# Altium footprint library WR-MPC3.PcbLib: 235 footprints (part 9 of 15)
Each footprint in its own frame and in the unit in brackets; x right, y up, seen from the top. Pads: shape width x height; smd on the part's side, far side on the other; paste and mask are expansions set on the pad; w line width, h text height; cw(c..) or ccw(c..) is an arc to the next point about the centre after c.
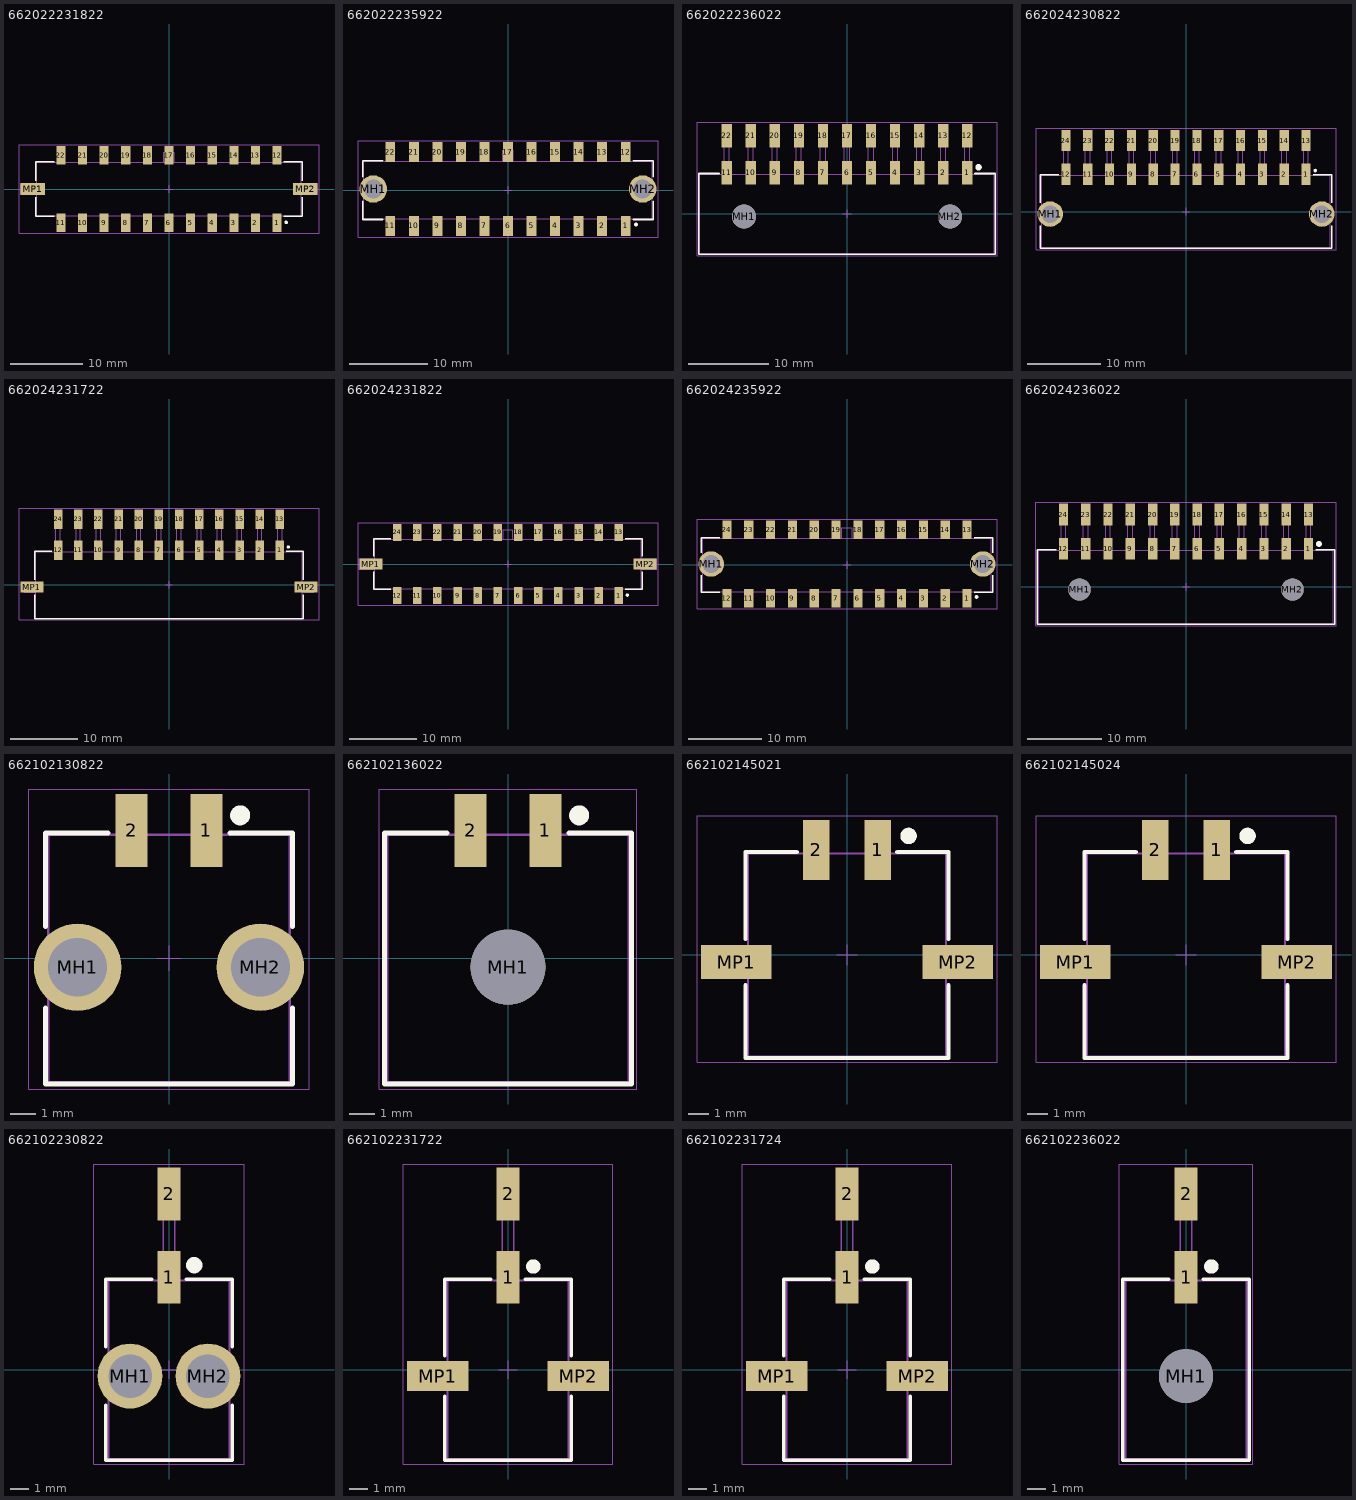
[diagram p8: the footprints below, top view; thin cyan lines are the x and y axes]

## 662022231822 [mm] "3.00mm SMT Male Dual Row Vertical Header with SMT Solder Tab, 22p"
height 9.9
pads (24):
  rect 1.27x2.54 smd: 1(15,-4.7) 2(12,-4.7) 3(9,-4.7) 4(6,-4.7) 5(3,-4.7) 6(0,-4.7) 7(-3,-4.7) 8(-6,-4.7) 9(-9,-4.7) 10(-12,-4.7) 11(-15,-4.7) 12(15,4.7) 13(12,4.7) 14(9,4.7) 15(6,4.7) 16(3,4.7) 17(0,4.7) 18(-3,4.7) 19(-6,4.7) 20(-9,4.7) 21(-12,4.7) 22(-15,4.7)
  rect 3.43x1.65 smd: MP1(-18.895,0) MP2(18.895,0)
Top Overlay:
  circle w0.25: c16.25,-4.625 r0.125
  lines w0.2: -18.5,-1.155 -18.5,-3.755 -15.95,-3.755 ; -18.5,1.155 -18.5,3.755 -15.95,3.755 ; 15.95,-3.755 18.5,-3.755 18.5,-1.155 ; 15.95,3.755 18.5,3.755 18.5,1.155
Top Designator:
  text ".Designator" at -7.498,-0.5 h1.5
Top Component Outline:
  lines w0.1: -18.35,-0.75 -20.6,-0.75 -20.6,0.75 -18.35,0.75 ; -15.32,-3.68 -15.32,-5.698 -14.68,-5.698 -14.68,-3.68 ; -15.32,3.68 -15.32,5.698 -14.68,5.698 -14.68,3.68 ; -12.32,-3.68 -12.32,-5.698 -11.68,-5.698 -11.68,-3.68 ; -12.32,3.68 -12.32,5.698 -11.68,5.698 -11.68,3.68 ; -9.32,-3.68 -9.32,-5.698 -8.68,-5.698 -8.68,-3.68 ; -9.32,3.68 -9.32,5.698 -8.68,5.698 -8.68,3.68 ; -6.32,-3.68 -6.32,-5.698 -5.68,-5.698 -5.68,-3.68 ; -6.32,3.68 -6.32,5.698 -5.68,5.698 -5.68,3.68 ; -3.32,-3.68 -3.32,-5.698 -2.68,-5.698 -2.68,-3.68 ; -3.32,3.68 -3.32,5.698 -2.68,5.698 -2.68,3.68 ; -0.7,3.68 -0.7,5.08 0.7,5.08 0.7,3.68 ; -0.32,-3.68 -0.32,-5.698 0.32,-5.698 0.32,-3.68 ; -0.32,3.68 -0.32,5.698 0.32,5.698 0.32,3.68 ; 2.68,-3.68 2.68,-5.698 3.32,-5.698 3.32,-3.68 ; 2.68,3.68 2.68,5.698 3.32,5.698 3.32,3.68 ; 5.68,-3.68 5.68,-5.698 6.32,-5.698 6.32,-3.68 ; 5.68,3.68 5.68,5.698 6.32,5.698 6.32,3.68 ; 8.68,-3.68 8.68,-5.698 9.32,-5.698 9.32,-3.68 ; 8.68,3.68 8.68,5.698 9.32,5.698 9.32,3.68 ; 11.68,-3.68 11.68,-5.698 12.32,-5.698 12.32,-3.68 ; 11.68,3.68 11.68,5.698 12.32,5.698 12.32,3.68 ; 14.68,-3.68 14.68,-5.698 15.32,-5.698 15.32,-3.68 ; 14.68,3.68 14.68,5.698 15.32,5.698 15.32,3.68 ; 18.35,-0.75 20.6,-0.75 20.6,0.75 18.35,0.75 ; -18.35,-3.68 18.35,-3.68 18.35,3.68 -18.35,3.68 -18.35,-3.68
Top 3D Body:
  lines w0.1: -18.35,-0.75 -20.6,-0.75 -20.6,0.75 -18.35,0.75 ; -15.32,-3.68 -15.32,-5.698 -14.68,-5.698 -14.68,-3.68 ; -15.32,3.68 -15.32,5.698 -14.68,5.698 -14.68,3.68 ; -12.32,-3.68 -12.32,-5.698 -11.68,-5.698 -11.68,-3.68 ; -12.32,3.68 -12.32,5.698 -11.68,5.698 -11.68,3.68 ; -9.32,-3.68 -9.32,-5.698 -8.68,-5.698 -8.68,-3.68 ; -9.32,3.68 -9.32,5.698 -8.68,5.698 -8.68,3.68 ; -6.32,-3.68 -6.32,-5.698 -5.68,-5.698 -5.68,-3.68 ; -6.32,3.68 -6.32,5.698 -5.68,5.698 -5.68,3.68 ; -3.32,-3.68 -3.32,-5.698 -2.68,-5.698 -2.68,-3.68 ; -3.32,3.68 -3.32,5.698 -2.68,5.698 -2.68,3.68 ; -0.7,3.68 -0.7,5.08 0.7,5.08 0.7,3.68 ; -0.32,-3.68 -0.32,-5.698 0.32,-5.698 0.32,-3.68 ; -0.32,3.68 -0.32,5.698 0.32,5.698 0.32,3.68 ; 2.68,-3.68 2.68,-5.698 3.32,-5.698 3.32,-3.68 ; 2.68,3.68 2.68,5.698 3.32,5.698 3.32,3.68 ; 5.68,-3.68 5.68,-5.698 6.32,-5.698 6.32,-3.68 ; 5.68,3.68 5.68,5.698 6.32,5.698 6.32,3.68 ; 8.68,-3.68 8.68,-5.698 9.32,-5.698 9.32,-3.68 ; 8.68,3.68 8.68,5.698 9.32,5.698 9.32,3.68 ; 11.68,-3.68 11.68,-5.698 12.32,-5.698 12.32,-3.68 ; 11.68,3.68 11.68,5.698 12.32,5.698 12.32,3.68 ; 14.68,-3.68 14.68,-5.698 15.32,-5.698 15.32,-3.68 ; 14.68,3.68 14.68,5.698 15.32,5.698 15.32,3.68 ; 18.35,-0.75 20.6,-0.75 20.6,0.75 18.35,0.75 ; -18.35,-3.68 18.35,-3.68 18.35,3.68 -18.35,3.68 -18.35,-3.68
Top Courtyard:
  lines w0.05: -20.81,-6.17 -20.81,6.17 20.81,6.17 20.81,-6.17 -20.81,-6.17
Top Component Center:
  lines w0.05: -0.5,0 0.5,0 ; 0,-0.5 0,0.5
3D body "662022231822.stp": height 9.93, standoff 0.03, extent -20.6,-5.698 20.6,5.698

## 662022235922 [mm] "Dual row SMT Vertical header With TH metal clip 22p"
height 9.9
pads (24):
  rect 1.27x2.54 smd: 1(15,-4.57) 2(12,-4.57) 3(9,-4.57) 4(6,-4.57) 5(3,-4.57) 6(0,-4.57) 7(-3,-4.57) 8(-6,-4.57) 9(-9,-4.57) 10(-12,-4.57) 11(-15,-4.57) 12(15,4.83) 13(12,4.83) 14(9,4.83) 15(6,4.83) 16(3,4.83) 17(0,4.83) 18(-3,4.83) 19(-6,4.83) 20(-9,4.83) 21(-12,4.83) 22(-15,4.83)
  round 3.5 hole 2.41: MH1(-17.16,0.13) MH2(17.16,0.13)
Top Overlay:
  circle w0.25: c16.3,-4.4 r0.125
  lines w0.2: -18.5,-1.405 -18.5,-3.755 -15.95,-3.755 ; -18.5,1.665 -18.5,3.755 -15.95,3.755 ; 15.95,-3.755 18.5,-3.755 18.5,-1.405 ; 15.95,3.755 18.5,3.755 18.5,1.665
Top Designator:
  text ".Designator" at -7.498,-0.5 h1.5
Top Component Outline:
  lines w0.1: -15.32,-3.68 -15.32,-5.5 -14.68,-5.5 -14.68,-3.68 ; -15.32,3.68 -15.32,5.9 -14.68,5.9 -14.68,3.68 ; -12.32,-3.68 -12.32,-5.5 -11.68,-5.5 -11.68,-3.68 ; -12.32,3.68 -12.32,5.9 -11.68,5.9 -11.68,3.68 ; -9.32,-3.68 -9.32,-5.5 -8.68,-5.5 -8.68,-3.68 ; -9.32,3.68 -9.32,5.9 -8.68,5.9 -8.68,3.68 ; -6.32,-3.68 -6.32,-5.5 -5.68,-5.5 -5.68,-3.68 ; -6.32,3.68 -6.32,5.9 -5.68,5.9 -5.68,3.68 ; -3.32,-3.68 -3.32,-5.5 -2.68,-5.5 -2.68,-3.68 ; -3.32,3.68 -3.32,5.9 -2.68,5.9 -2.68,3.68 ; -0.7,3.68 -0.7,5.08 0.7,5.08 0.7,3.68 ; -0.32,-3.68 -0.32,-5.5 0.32,-5.5 0.32,-3.68 ; -0.32,3.68 -0.32,5.9 0.32,5.9 0.32,3.68 ; 2.68,-3.68 2.68,-5.5 3.32,-5.5 3.32,-3.68 ; 2.68,3.68 2.68,5.9 3.32,5.9 3.32,3.68 ; 5.68,-3.68 5.68,-5.5 6.32,-5.5 6.32,-3.68 ; 5.68,3.68 5.68,5.9 6.32,5.9 6.32,3.68 ; 8.68,-3.68 8.68,-5.5 9.32,-5.5 9.32,-3.68 ; 8.68,3.68 8.68,5.9 9.32,5.9 9.32,3.68 ; 11.68,-3.68 11.68,-5.5 12.32,-5.5 12.32,-3.68 ; 11.68,3.68 11.68,5.9 12.32,5.9 12.32,3.68 ; 14.68,-3.68 14.68,-5.5 15.32,-5.5 15.32,-3.68 ; 14.68,3.68 14.68,5.9 15.32,5.9 15.32,3.68 ; -18.35,-3.68 -18.35,3.68 18.35,3.68 18.35,-3.68 -18.35,-3.68
Top 3D Body:
  lines w0.1: -15.32,-3.68 -15.32,-5.5 -14.68,-5.5 -14.68,-3.68 ; -15.32,3.68 -15.32,5.9 -14.68,5.9 -14.68,3.68 ; -12.32,-3.68 -12.32,-5.5 -11.68,-5.5 -11.68,-3.68 ; -12.32,3.68 -12.32,5.9 -11.68,5.9 -11.68,3.68 ; -9.32,-3.68 -9.32,-5.5 -8.68,-5.5 -8.68,-3.68 ; -9.32,3.68 -9.32,5.9 -8.68,5.9 -8.68,3.68 ; -6.32,-3.68 -6.32,-5.5 -5.68,-5.5 -5.68,-3.68 ; -6.32,3.68 -6.32,5.9 -5.68,5.9 -5.68,3.68 ; -3.32,-3.68 -3.32,-5.5 -2.68,-5.5 -2.68,-3.68 ; -3.32,3.68 -3.32,5.9 -2.68,5.9 -2.68,3.68 ; -0.7,3.68 -0.7,5.08 0.7,5.08 0.7,3.68 ; -0.32,-3.68 -0.32,-5.5 0.32,-5.5 0.32,-3.68 ; -0.32,3.68 -0.32,5.9 0.32,5.9 0.32,3.68 ; 2.68,-3.68 2.68,-5.5 3.32,-5.5 3.32,-3.68 ; 2.68,3.68 2.68,5.9 3.32,5.9 3.32,3.68 ; 5.68,-3.68 5.68,-5.5 6.32,-5.5 6.32,-3.68 ; 5.68,3.68 5.68,5.9 6.32,5.9 6.32,3.68 ; 8.68,-3.68 8.68,-5.5 9.32,-5.5 9.32,-3.68 ; 8.68,3.68 8.68,5.9 9.32,5.9 9.32,3.68 ; 11.68,-3.68 11.68,-5.5 12.32,-5.5 12.32,-3.68 ; 11.68,3.68 11.68,5.9 12.32,5.9 12.32,3.68 ; 14.68,-3.68 14.68,-5.5 15.32,-5.5 15.32,-3.68 ; 14.68,3.68 14.68,5.9 15.32,5.9 15.32,3.68 ; -18.35,-3.68 -18.35,3.68 18.35,3.68 18.35,-3.68 -18.35,-3.68
Top Courtyard:
  lines w0.05: -19.11,-6.04 -19.11,6.3 19.11,6.3 19.11,-6.04 -19.11,-6.04
Top Component Center:
  lines w0.05: -0.5,0 0.5,0 ; 0,-0.5 0,0.5
3D body "662022235922.stp": height 9.92, standoff -3.08, extent -18.35,-5.5 18.35,5.9

## 662022236022 [mm] "3.00mm SMT Male Dual Row Angled Header with Plastic Pegs, 22p"
height 8.26
pads (24):
  rect 1.27x2.92 smd: 1(15,5.13) 2(12,5.13) 3(9,5.13) 4(6,5.13) 5(3,5.13) 6(0,5.13) 7(-3,5.13) 8(-6,5.13) 9(-9,5.13) 10(-12,5.13) 11(-15,5.13) 12(15,9.75) 13(12,9.75) 14(9,9.75) 15(6,9.75) 16(3,9.75) 17(0,9.75) 18(-3,9.75) 19(-6,9.75) 20(-9,9.75) 21(-12,9.75) 22(-15,9.75)
  round 3 hole 3 unplated: MH1(-12.84,-0.35) MH2(12.84,-0.35)
Top Overlay:
  circle w0.4: c16.4,5.8 r0.2
  lines w0.2: -15.95,5.025 -18.5,5.025 -18.5,-5.025 18.5,-5.025 18.5,5.025 15.95,5.025
Top Designator:
  text ".Designator" at -7.498,-0.5 h1.5
Top Component Outline:
  lines w0.1: -15.32,4.95 -15.32,10.95 -14.68,10.95 -14.68,4.95 ; -15.32,6.3 -14.68,6.3 ; -12.32,4.95 -12.32,10.95 -11.68,10.95 -11.68,4.95 ; -12.32,6.3 -11.68,6.3 ; -9.32,4.95 -9.32,10.95 -8.68,10.95 -8.68,4.95 ; -9.32,6.3 -8.68,6.3 ; -6.32,4.95 -6.32,10.95 -5.68,10.95 -5.68,4.95 ; -6.32,6.3 -5.68,6.3 ; -3.32,4.95 -3.32,10.95 -2.68,10.95 -2.68,4.95 ; -3.32,6.3 -2.68,6.3 ; -0.32,4.95 -0.32,10.95 0.32,10.95 0.32,4.95 ; -0.32,6.3 0.32,6.3 ; 2.68,4.95 2.68,10.95 3.32,10.95 3.32,4.95 ; 2.68,6.3 3.32,6.3 ; 5.68,4.95 5.68,10.95 6.32,10.95 6.32,4.95 ; 5.68,6.3 6.32,6.3 ; 8.68,4.95 8.68,10.95 9.32,10.95 9.32,4.95 ; 8.68,6.3 9.32,6.3 ; 11.68,4.95 11.68,10.95 12.32,10.95 12.32,4.95 ; 11.68,6.3 12.32,6.3 ; 14.68,4.95 14.68,10.95 15.32,10.95 15.32,4.95 ; 14.68,6.3 15.32,6.3 ; -18.35,-4.95 18.35,-4.95 18.35,4.95 -18.35,4.95 -18.35,-4.95
Top 3D Body:
  lines w0.1: -15.32,4.95 -15.32,10.95 -14.68,10.95 -14.68,4.95 ; -15.32,6.3 -14.68,6.3 ; -12.32,4.95 -12.32,10.95 -11.68,10.95 -11.68,4.95 ; -12.32,6.3 -11.68,6.3 ; -9.32,4.95 -9.32,10.95 -8.68,10.95 -8.68,4.95 ; -9.32,6.3 -8.68,6.3 ; -6.32,4.95 -6.32,10.95 -5.68,10.95 -5.68,4.95 ; -6.32,6.3 -5.68,6.3 ; -3.32,4.95 -3.32,10.95 -2.68,10.95 -2.68,4.95 ; -3.32,6.3 -2.68,6.3 ; -0.32,4.95 -0.32,10.95 0.32,10.95 0.32,4.95 ; -0.32,6.3 0.32,6.3 ; 2.68,4.95 2.68,10.95 3.32,10.95 3.32,4.95 ; 2.68,6.3 3.32,6.3 ; 5.68,4.95 5.68,10.95 6.32,10.95 6.32,4.95 ; 5.68,6.3 6.32,6.3 ; 8.68,4.95 8.68,10.95 9.32,10.95 9.32,4.95 ; 8.68,6.3 9.32,6.3 ; 11.68,4.95 11.68,10.95 12.32,10.95 12.32,4.95 ; 11.68,6.3 12.32,6.3 ; 14.68,4.95 14.68,10.95 15.32,10.95 15.32,4.95 ; 14.68,6.3 15.32,6.3 ; -18.35,-4.95 18.35,-4.95 18.35,4.95 -18.35,4.95 -18.35,-4.95
Top Courtyard:
  lines w0.05: -18.7,-5.225 18.7,-5.225 18.7,11.41 -18.7,11.41 -18.7,-5.225
Top Component Center:
  lines w0.05: -0.5,0 0.5,0 ; 0,-0.5 0,0.5
3D body "662022236022.stp": height 8.79, standoff -3.17, extent -18.35,-4.95 18.35,10.95

## 662024230822 [mm] "Dual row SMT Right angle header With TH Metal Clip 24p"
height 8.76
pads (26):
  rect 1.27x2.92 smd: 1(16.5,5.13) 2(13.5,5.13) 3(10.5,5.13) 4(7.5,5.13) 5(4.5,5.13) 6(1.5,5.13) 7(-1.5,5.13) 8(-4.5,5.13) 9(-7.5,5.13) 10(-10.5,5.13) 11(-13.5,5.13) 12(-16.5,5.13) 13(16.5,9.75) 14(13.5,9.75) 15(10.5,9.75) 16(7.5,9.75) 17(4.5,9.75) 18(1.5,9.75) 19(-1.5,9.75) 20(-4.5,9.75) 21(-7.5,9.75) 22(-10.5,9.75) 23(-13.5,9.75) 24(-16.5,9.75)
  round 3.5 hole 2.41: MH1(-18.66,-0.35) MH2(18.66,-0.35)
Top Overlay:
  circle w0.25: c17.75,5.625 r0.125
  lines w0.2: -20,-1.925 -20,-5.025 20,-5.025 20,-1.925 ; -20,1.225 -20,5.025 -17.45,5.025 ; 17.45,5.025 20,5.025 20,1.225
Top Designator:
  text ".Designator" at -7.498,-0.5 h1.5
Top Component Outline:
  lines w0.1: -16.82,4.95 -16.82,10.95 -16.18,10.95 -16.18,4.95 ; -16.82,6.3 -16.18,6.3 ; -13.82,4.95 -13.82,10.95 -13.18,10.95 -13.18,4.95 ; -13.82,6.3 -13.18,6.3 ; -10.82,4.95 -10.82,10.95 -10.18,10.95 -10.18,4.95 ; -10.82,6.3 -10.18,6.3 ; -7.82,4.95 -7.82,10.95 -7.18,10.95 -7.18,4.95 ; -7.82,6.3 -7.18,6.3 ; -4.82,4.95 -4.82,10.95 -4.18,10.95 -4.18,4.95 ; -4.82,6.3 -4.18,6.3 ; -1.82,4.95 -1.82,10.95 -1.18,10.95 -1.18,4.95 ; -1.82,6.3 -1.18,6.3 ; 1.18,4.95 1.18,10.95 1.82,10.95 1.82,4.95 ; 1.18,6.3 1.82,6.3 ; 4.18,4.95 4.18,10.95 4.82,10.95 4.82,4.95 ; 4.18,6.3 4.82,6.3 ; 7.18,4.95 7.18,10.95 7.82,10.95 7.82,4.95 ; 7.18,6.3 7.82,6.3 ; 10.18,4.95 10.18,10.95 10.82,10.95 10.82,4.95 ; 10.18,6.3 10.82,6.3 ; 13.18,4.95 13.18,10.95 13.82,10.95 13.82,4.95 ; 13.18,6.3 13.82,6.3 ; 16.18,4.95 16.18,10.95 16.82,10.95 16.82,4.95 ; 16.18,6.3 16.82,6.3 ; -19.85,-4.95 19.85,-4.95 19.85,4.95 -19.85,4.95 -19.85,-4.95
Top 3D Body:
  lines w0.1: -16.82,4.95 -16.82,10.95 -16.18,10.95 -16.18,4.95 ; -16.82,6.3 -16.18,6.3 ; -13.82,4.95 -13.82,10.95 -13.18,10.95 -13.18,4.95 ; -13.82,6.3 -13.18,6.3 ; -10.82,4.95 -10.82,10.95 -10.18,10.95 -10.18,4.95 ; -10.82,6.3 -10.18,6.3 ; -7.82,4.95 -7.82,10.95 -7.18,10.95 -7.18,4.95 ; -7.82,6.3 -7.18,6.3 ; -4.82,4.95 -4.82,10.95 -4.18,10.95 -4.18,4.95 ; -4.82,6.3 -4.18,6.3 ; -1.82,4.95 -1.82,10.95 -1.18,10.95 -1.18,4.95 ; -1.82,6.3 -1.18,6.3 ; 1.18,4.95 1.18,10.95 1.82,10.95 1.82,4.95 ; 1.18,6.3 1.82,6.3 ; 4.18,4.95 4.18,10.95 4.82,10.95 4.82,4.95 ; 4.18,6.3 4.82,6.3 ; 7.18,4.95 7.18,10.95 7.82,10.95 7.82,4.95 ; 7.18,6.3 7.82,6.3 ; 10.18,4.95 10.18,10.95 10.82,10.95 10.82,4.95 ; 10.18,6.3 10.82,6.3 ; 13.18,4.95 13.18,10.95 13.82,10.95 13.82,4.95 ; 13.18,6.3 13.82,6.3 ; 16.18,4.95 16.18,10.95 16.82,10.95 16.82,4.95 ; 16.18,6.3 16.82,6.3 ; -19.85,-4.95 -19.85,4.95 19.85,4.95 19.85,-4.95 -19.85,-4.95
Top Courtyard:
  lines w0.05: -20.61,-5.225 20.61,-5.225 20.61,11.41 -20.61,11.41 -20.61,-5.225
Top Component Center:
  lines w0.05: -0.5,0 0.5,0 ; 0,-0.5 0,0.5
3D body "662024230822.stp": height 8.78, standoff -3.08, extent -19.85,-4.95 19.85,10.95

## 662024231722 [mm] "3.00mm SMT Male Dual Row Angled Header with SMT Solder Tab, 24p"
height 8.26
pads (26):
  rect 1.27x2.92 smd: 1(16.5,5.13) 2(13.5,5.13) 3(10.5,5.13) 4(7.5,5.13) 5(4.5,5.13) 6(1.5,5.13) 7(-1.5,5.13) 8(-4.5,5.13) 9(-7.5,5.13) 10(-10.5,5.13) 11(-13.5,5.13) 12(-16.5,5.13) 13(16.5,9.75) 14(13.5,9.75) 15(10.5,9.75) 16(7.5,9.75) 17(4.5,9.75) 18(1.5,9.75) 19(-1.5,9.75) 20(-4.5,9.75) 21(-7.5,9.75) 22(-10.5,9.75) 23(-13.5,9.75) 24(-16.5,9.75)
  rect 3.43x1.65 smd: MP1(-20.395,-0.35) MP2(20.395,-0.35)
Top Overlay:
  circle w0.25: c17.75,5.625 r0.125
  lines w0.2: -20,-1.475 -20,-5.025 20,-5.025 20,-1.475 ; -20,0.775 -20,5.025 -17.45,5.025 ; 17.45,5.025 20,5.025 20,0.775
Top Designator:
  text ".Designator" at -7.498,-0.5 h1.5
Top Component Outline:
  lines w0.1: -19.85,-1.1 -21.55,-1.1 -21.55,0.4 -19.85,0.4 ; -16.82,4.95 -16.82,10.95 -16.18,10.95 -16.18,4.95 ; -16.82,6.3 -16.18,6.3 ; -13.82,4.95 -13.82,10.95 -13.18,10.95 -13.18,4.95 ; -13.82,6.3 -13.18,6.3 ; -10.82,4.95 -10.82,10.95 -10.18,10.95 -10.18,4.95 ; -10.82,6.3 -10.18,6.3 ; -7.82,4.95 -7.82,10.95 -7.18,10.95 -7.18,4.95 ; -7.82,6.3 -7.18,6.3 ; -4.82,4.95 -4.82,10.95 -4.18,10.95 -4.18,4.95 ; -4.82,6.3 -4.18,6.3 ; -1.82,4.95 -1.82,10.95 -1.18,10.95 -1.18,4.95 ; -1.82,6.3 -1.18,6.3 ; 1.18,4.95 1.18,10.95 1.82,10.95 1.82,4.95 ; 1.18,6.3 1.82,6.3 ; 4.18,4.95 4.18,10.95 4.82,10.95 4.82,4.95 ; 4.18,6.3 4.82,6.3 ; 7.18,4.95 7.18,10.95 7.82,10.95 7.82,4.95 ; 7.18,6.3 7.82,6.3 ; 10.18,4.95 10.18,10.95 10.82,10.95 10.82,4.95 ; 10.18,6.3 10.82,6.3 ; 13.18,4.95 13.18,10.95 13.82,10.95 13.82,4.95 ; 13.18,6.3 13.82,6.3 ; 16.18,4.95 16.18,10.95 16.82,10.95 16.82,4.95 ; 16.18,6.3 16.82,6.3 ; 19.85,-1.1 21.55,-1.1 21.55,0.4 19.85,0.4 ; -19.85,-4.95 19.85,-4.95 19.85,4.95 -19.85,4.95 -19.85,-4.95
Top 3D Body:
  lines w0.1: -19.85,-1.1 -21.55,-1.1 -21.55,0.4 -19.85,0.4 ; -16.82,4.95 -16.82,10.95 -16.18,10.95 -16.18,4.95 ; -16.82,6.3 -16.18,6.3 ; -13.82,4.95 -13.82,10.95 -13.18,10.95 -13.18,4.95 ; -13.82,6.3 -13.18,6.3 ; -10.82,4.95 -10.82,10.95 -10.18,10.95 -10.18,4.95 ; -10.82,6.3 -10.18,6.3 ; -7.82,4.95 -7.82,10.95 -7.18,10.95 -7.18,4.95 ; -7.82,6.3 -7.18,6.3 ; -4.82,4.95 -4.82,10.95 -4.18,10.95 -4.18,4.95 ; -4.82,6.3 -4.18,6.3 ; -1.82,4.95 -1.82,10.95 -1.18,10.95 -1.18,4.95 ; -1.82,6.3 -1.18,6.3 ; 1.18,4.95 1.18,10.95 1.82,10.95 1.82,4.95 ; 1.18,6.3 1.82,6.3 ; 4.18,4.95 4.18,10.95 4.82,10.95 4.82,4.95 ; 4.18,6.3 4.82,6.3 ; 7.18,4.95 7.18,10.95 7.82,10.95 7.82,4.95 ; 7.18,6.3 7.82,6.3 ; 10.18,4.95 10.18,10.95 10.82,10.95 10.82,4.95 ; 10.18,6.3 10.82,6.3 ; 13.18,4.95 13.18,10.95 13.82,10.95 13.82,4.95 ; 13.18,6.3 13.82,6.3 ; 16.18,4.95 16.18,10.95 16.82,10.95 16.82,4.95 ; 16.18,6.3 16.82,6.3 ; 19.85,-1.1 21.55,-1.1 21.55,0.4 19.85,0.4 ; -19.85,-4.95 -19.85,4.95 19.85,4.95 19.85,-4.95 -19.85,-4.95
Top Courtyard:
  lines w0.05: -22.31,-5.225 -22.31,11.41 22.31,11.41 22.31,-5.225 -22.31,-5.225
Top Component Center:
  lines w0.05: -0.5,0 0.5,0 ; 0,-0.5 0,0.5
3D body "662024231722.stp": height 8.79, standoff 0.03, extent -21.55,-4.95 21.55,10.95

## 662024231822 [mm] "3.00mm SMT Male Dual Row Vertical Header with SMT Solder Tab, 24p"
height 9.9
pads (26):
  rect 1.27x2.54 smd: 1(16.5,-4.7) 2(13.5,-4.7) 3(10.5,-4.7) 4(7.5,-4.7) 5(4.5,-4.7) 6(1.5,-4.7) 7(-1.5,-4.7) 8(-4.5,-4.7) 9(-7.5,-4.7) 10(-10.5,-4.7) 11(-13.5,-4.7) 12(-16.5,-4.7) 13(16.5,4.7) 14(13.5,4.7) 15(10.5,4.7) 16(7.5,4.7) 17(4.5,4.7) 18(1.5,4.7) 19(-1.5,4.7) 20(-4.5,4.7) 21(-7.5,4.7) 22(-10.5,4.7) 23(-13.5,4.7) 24(-16.5,4.7)
  rect 3.43x1.65 smd: MP1(-20.395,0) MP2(20.395,0)
Top Overlay:
  circle w0.25: c17.75,-4.625 r0.125
  lines w0.2: -20,-1.155 -20,-3.755 -17.45,-3.755 ; -20,1.155 -20,3.755 -17.45,3.755 ; 17.45,-3.755 20,-3.755 20,-1.155 ; 17.45,3.755 20,3.755 20,1.155
Top Designator:
  text ".Designator" at -7.498,-0.5 h1.5
Top Component Outline:
  lines w0.1: -19.85,-0.75 -22.1,-0.75 -22.1,0.75 -19.85,0.75 ; -16.82,-3.68 -16.82,-5.698 -16.18,-5.698 -16.18,-3.68 ; -16.82,3.68 -16.82,5.698 -16.18,5.698 -16.18,3.68 ; -13.82,-3.68 -13.82,-5.698 -13.18,-5.698 -13.18,-3.68 ; -13.82,3.68 -13.82,5.698 -13.18,5.698 -13.18,3.68 ; -10.82,-3.68 -10.82,-5.698 -10.18,-5.698 -10.18,-3.68 ; -10.82,3.68 -10.82,5.698 -10.18,5.698 -10.18,3.68 ; -7.82,-3.68 -7.82,-5.698 -7.18,-5.698 -7.18,-3.68 ; -7.82,3.68 -7.82,5.698 -7.18,5.698 -7.18,3.68 ; -4.82,-3.68 -4.82,-5.698 -4.18,-5.698 -4.18,-3.68 ; -4.82,3.68 -4.82,5.698 -4.18,5.698 -4.18,3.68 ; -1.82,-3.68 -1.82,-5.698 -1.18,-5.698 -1.18,-3.68 ; -1.82,3.68 -1.82,5.698 -1.18,5.698 -1.18,3.68 ; -0.7,3.68 -0.7,5.08 0.7,5.08 0.7,3.68 ; 1.18,-3.68 1.18,-5.698 1.82,-5.698 1.82,-3.68 ; 1.18,3.68 1.18,5.698 1.82,5.698 1.82,3.68 ; 4.18,-3.68 4.18,-5.698 4.82,-5.698 4.82,-3.68 ; 4.18,3.68 4.18,5.698 4.82,5.698 4.82,3.68 ; 7.18,-3.68 7.18,-5.698 7.82,-5.698 7.82,-3.68 ; 7.18,3.68 7.18,5.698 7.82,5.698 7.82,3.68 ; 10.18,-3.68 10.18,-5.698 10.82,-5.698 10.82,-3.68 ; 10.18,3.68 10.18,5.698 10.82,5.698 10.82,3.68 ; 13.18,-3.68 13.18,-5.698 13.82,-5.698 13.82,-3.68 ; 13.18,3.68 13.18,5.698 13.82,5.698 13.82,3.68 ; 16.18,-3.68 16.18,-5.698 16.82,-5.698 16.82,-3.68 ; 16.18,3.68 16.18,5.698 16.82,5.698 16.82,3.68 ; 19.85,-0.75 22.1,-0.75 22.1,0.75 19.85,0.75 ; -19.85,-3.68 -19.85,3.68 19.85,3.68 19.85,-3.68 -19.85,-3.68
Top 3D Body:
  lines w0.1: -19.85,-0.75 -22.1,-0.75 -22.1,0.75 -19.85,0.75 ; -16.82,-3.68 -16.82,-5.698 -16.18,-5.698 -16.18,-3.68 ; -16.82,3.68 -16.82,5.698 -16.18,5.698 -16.18,3.68 ; -13.82,-3.68 -13.82,-5.698 -13.18,-5.698 -13.18,-3.68 ; -13.82,3.68 -13.82,5.698 -13.18,5.698 -13.18,3.68 ; -10.82,-3.68 -10.82,-5.698 -10.18,-5.698 -10.18,-3.68 ; -10.82,3.68 -10.82,5.698 -10.18,5.698 -10.18,3.68 ; -7.82,-3.68 -7.82,-5.698 -7.18,-5.698 -7.18,-3.68 ; -7.82,3.68 -7.82,5.698 -7.18,5.698 -7.18,3.68 ; -4.82,-3.68 -4.82,-5.698 -4.18,-5.698 -4.18,-3.68 ; -4.82,3.68 -4.82,5.698 -4.18,5.698 -4.18,3.68 ; -1.82,-3.68 -1.82,-5.698 -1.18,-5.698 -1.18,-3.68 ; -1.82,3.68 -1.82,5.698 -1.18,5.698 -1.18,3.68 ; -0.7,3.68 -0.7,5.08 0.7,5.08 0.7,3.68 ; 1.18,-3.68 1.18,-5.698 1.82,-5.698 1.82,-3.68 ; 1.18,3.68 1.18,5.698 1.82,5.698 1.82,3.68 ; 4.18,-3.68 4.18,-5.698 4.82,-5.698 4.82,-3.68 ; 4.18,3.68 4.18,5.698 4.82,5.698 4.82,3.68 ; 7.18,-3.68 7.18,-5.698 7.82,-5.698 7.82,-3.68 ; 7.18,3.68 7.18,5.698 7.82,5.698 7.82,3.68 ; 10.18,-3.68 10.18,-5.698 10.82,-5.698 10.82,-3.68 ; 10.18,3.68 10.18,5.698 10.82,5.698 10.82,3.68 ; 13.18,-3.68 13.18,-5.698 13.82,-5.698 13.82,-3.68 ; 13.18,3.68 13.18,5.698 13.82,5.698 13.82,3.68 ; 16.18,-3.68 16.18,-5.698 16.82,-5.698 16.82,-3.68 ; 16.18,3.68 16.18,5.698 16.82,5.698 16.82,3.68 ; 19.85,-0.75 22.1,-0.75 22.1,0.75 19.85,0.75 ; -19.85,-3.68 -19.85,3.68 19.85,3.68 19.85,-3.68 -19.85,-3.68
Top Courtyard:
  lines w0.05: -22.31,-6.17 22.31,-6.17 22.31,6.17 -22.31,6.17 -22.31,-6.17
Top Component Center:
  lines w0.05: -0.5,0 0.5,0 ; 0,-0.5 0,0.5
3D body "662024231822.stp": height 9.93, standoff 0.03, extent -22.1,-5.698 22.1,5.698

## 662024235922 [mm] "Dual row SMT Vertical header With TH metal clip 24p"
height 9.9
pads (26):
  rect 1.27x2.54 smd: 1(16.5,-4.57) 2(13.5,-4.57) 3(10.5,-4.57) 4(7.5,-4.57) 5(4.5,-4.57) 6(1.5,-4.57) 7(-1.5,-4.57) 8(-4.5,-4.57) 9(-7.5,-4.57) 10(-10.5,-4.57) 11(-13.5,-4.57) 12(-16.5,-4.57) 13(16.5,4.83) 14(13.5,4.83) 15(10.5,4.83) 16(7.5,4.83) 17(4.5,4.83) 18(1.5,4.83) 19(-1.5,4.83) 20(-4.5,4.83) 21(-7.5,4.83) 22(-10.5,4.83) 23(-13.5,4.83) 24(-16.5,4.83)
  round 3.5 hole 2.41: MH1(-18.66,0.13) MH2(18.66,0.13)
Top Overlay:
  circle w0.25: c17.8,-4.4 r0.125
  lines w0.2: -20,-1.405 -20,-3.755 -17.45,-3.755 ; -20,1.665 -20,3.755 -17.45,3.755 ; 17.45,-3.755 20,-3.755 20,-1.405 ; 17.45,3.755 20,3.755 20,1.665
Top Designator:
  text ".Designator" at -7.498,-0.5 h1.5
Top Component Outline:
  lines w0.1: -16.82,-3.68 -16.82,-5.5 -16.18,-5.5 -16.18,-3.68 ; -16.82,3.68 -16.82,5.9 -16.18,5.9 -16.18,3.68 ; -13.82,-3.68 -13.82,-5.5 -13.18,-5.5 -13.18,-3.68 ; -13.82,3.68 -13.82,5.9 -13.18,5.9 -13.18,3.68 ; -10.82,-3.68 -10.82,-5.5 -10.18,-5.5 -10.18,-3.68 ; -10.82,3.68 -10.82,5.9 -10.18,5.9 -10.18,3.68 ; -7.82,-3.68 -7.82,-5.5 -7.18,-5.5 -7.18,-3.68 ; -7.82,3.68 -7.82,5.9 -7.18,5.9 -7.18,3.68 ; -4.82,-3.68 -4.82,-5.5 -4.18,-5.5 -4.18,-3.68 ; -4.82,3.68 -4.82,5.9 -4.18,5.9 -4.18,3.68 ; -1.82,-3.68 -1.82,-5.5 -1.18,-5.5 -1.18,-3.68 ; -1.82,3.68 -1.82,5.9 -1.18,5.9 -1.18,3.68 ; -0.7,3.68 -0.7,5.08 0.7,5.08 0.7,3.68 ; 1.18,-3.68 1.18,-5.5 1.82,-5.5 1.82,-3.68 ; 1.18,3.68 1.18,5.9 1.82,5.9 1.82,3.68 ; 4.18,-3.68 4.18,-5.5 4.82,-5.5 4.82,-3.68 ; 4.18,3.68 4.18,5.9 4.82,5.9 4.82,3.68 ; 7.18,-3.68 7.18,-5.5 7.82,-5.5 7.82,-3.68 ; 7.18,3.68 7.18,5.9 7.82,5.9 7.82,3.68 ; 10.18,-3.68 10.18,-5.5 10.82,-5.5 10.82,-3.68 ; 10.18,3.68 10.18,5.9 10.82,5.9 10.82,3.68 ; 13.18,-3.68 13.18,-5.5 13.82,-5.5 13.82,-3.68 ; 13.18,3.68 13.18,5.9 13.82,5.9 13.82,3.68 ; 16.18,-3.68 16.18,-5.5 16.82,-5.5 16.82,-3.68 ; 16.18,3.68 16.18,5.9 16.82,5.9 16.82,3.68 ; -19.85,-3.68 19.85,-3.68 19.85,3.68 -19.85,3.68 -19.85,-3.68
Top 3D Body:
  lines w0.1: -16.82,-3.68 -16.82,-5.5 -16.18,-5.5 -16.18,-3.68 ; -16.82,3.68 -16.82,5.9 -16.18,5.9 -16.18,3.68 ; -13.82,-3.68 -13.82,-5.5 -13.18,-5.5 -13.18,-3.68 ; -13.82,3.68 -13.82,5.9 -13.18,5.9 -13.18,3.68 ; -10.82,-3.68 -10.82,-5.5 -10.18,-5.5 -10.18,-3.68 ; -10.82,3.68 -10.82,5.9 -10.18,5.9 -10.18,3.68 ; -7.82,-3.68 -7.82,-5.5 -7.18,-5.5 -7.18,-3.68 ; -7.82,3.68 -7.82,5.9 -7.18,5.9 -7.18,3.68 ; -4.82,-3.68 -4.82,-5.5 -4.18,-5.5 -4.18,-3.68 ; -4.82,3.68 -4.82,5.9 -4.18,5.9 -4.18,3.68 ; -1.82,-3.68 -1.82,-5.5 -1.18,-5.5 -1.18,-3.68 ; -1.82,3.68 -1.82,5.9 -1.18,5.9 -1.18,3.68 ; -0.7,3.68 -0.7,5.08 0.7,5.08 0.7,3.68 ; 1.18,-3.68 1.18,-5.5 1.82,-5.5 1.82,-3.68 ; 1.18,3.68 1.18,5.9 1.82,5.9 1.82,3.68 ; 4.18,-3.68 4.18,-5.5 4.82,-5.5 4.82,-3.68 ; 4.18,3.68 4.18,5.9 4.82,5.9 4.82,3.68 ; 7.18,-3.68 7.18,-5.5 7.82,-5.5 7.82,-3.68 ; 7.18,3.68 7.18,5.9 7.82,5.9 7.82,3.68 ; 10.18,-3.68 10.18,-5.5 10.82,-5.5 10.82,-3.68 ; 10.18,3.68 10.18,5.9 10.82,5.9 10.82,3.68 ; 13.18,-3.68 13.18,-5.5 13.82,-5.5 13.82,-3.68 ; 13.18,3.68 13.18,5.9 13.82,5.9 13.82,3.68 ; 16.18,-3.68 16.18,-5.5 16.82,-5.5 16.82,-3.68 ; 16.18,3.68 16.18,5.9 16.82,5.9 16.82,3.68 ; -19.85,-3.68 19.85,-3.68 19.85,3.68 -19.85,3.68 -19.85,-3.68
Top Courtyard:
  lines w0.05: -20.61,-6.04 20.61,-6.04 20.61,6.3 -20.61,6.3 -20.61,-6.04
Top Component Center:
  lines w0.05: -0.5,0 0.5,0 ; 0,-0.5 0,0.5
3D body "662024235922.stp": height 9.92, standoff -3.08, extent -19.85,-5.5 19.85,5.9

## 662024236022 [mm] "3.00mm SMT Male Dual Row Angled Header with Plastic Pegs, 24p"
height 8.26
pads (26):
  rect 1.27x2.92 smd: 1(16.5,5.13) 2(13.5,5.13) 3(10.5,5.13) 4(7.5,5.13) 5(4.5,5.13) 6(1.5,5.13) 7(-1.5,5.13) 8(-4.5,5.13) 9(-7.5,5.13) 10(-10.5,5.13) 11(-13.5,5.13) 12(-16.5,5.13) 13(16.5,9.75) 14(13.5,9.75) 15(10.5,9.75) 16(7.5,9.75) 17(4.5,9.75) 18(1.5,9.75) 19(-1.5,9.75) 20(-4.5,9.75) 21(-7.5,9.75) 22(-10.5,9.75) 23(-13.5,9.75) 24(-16.5,9.75)
  round 3 hole 3 unplated: MH1(-14.34,-0.35) MH2(14.34,-0.35)
Top Overlay:
  circle w0.4: c17.9,5.8 r0.2
  lines w0.2: -17.45,5.025 -20,5.025 -20,-5.025 20,-5.025 20,5.025 17.45,5.025
Top Designator:
  text ".Designator" at -7.498,-0.5 h1.5
Top Component Outline:
  lines w0.1: -16.82,4.95 -16.82,10.95 -16.18,10.95 -16.18,4.95 ; -16.82,6.3 -16.18,6.3 ; -13.82,4.95 -13.82,10.95 -13.18,10.95 -13.18,4.95 ; -13.82,6.3 -13.18,6.3 ; -10.82,4.95 -10.82,10.95 -10.18,10.95 -10.18,4.95 ; -10.82,6.3 -10.18,6.3 ; -7.82,4.95 -7.82,10.95 -7.18,10.95 -7.18,4.95 ; -7.82,6.3 -7.18,6.3 ; -4.82,4.95 -4.82,10.95 -4.18,10.95 -4.18,4.95 ; -4.82,6.3 -4.18,6.3 ; -1.82,4.95 -1.82,10.95 -1.18,10.95 -1.18,4.95 ; -1.82,6.3 -1.18,6.3 ; 1.18,4.95 1.18,10.95 1.82,10.95 1.82,4.95 ; 1.18,6.3 1.82,6.3 ; 4.18,4.95 4.18,10.95 4.82,10.95 4.82,4.95 ; 4.18,6.3 4.82,6.3 ; 7.18,4.95 7.18,10.95 7.82,10.95 7.82,4.95 ; 7.18,6.3 7.82,6.3 ; 10.18,4.95 10.18,10.95 10.82,10.95 10.82,4.95 ; 10.18,6.3 10.82,6.3 ; 13.18,4.95 13.18,10.95 13.82,10.95 13.82,4.95 ; 13.18,6.3 13.82,6.3 ; 16.18,4.95 16.18,10.95 16.82,10.95 16.82,4.95 ; 16.18,6.3 16.82,6.3 ; -19.85,-4.95 19.85,-4.95 19.85,4.95 -19.85,4.95 -19.85,-4.95
Top 3D Body:
  lines w0.1: -16.82,4.95 -16.82,10.95 -16.18,10.95 -16.18,4.95 ; -16.82,6.3 -16.18,6.3 ; -13.82,4.95 -13.82,10.95 -13.18,10.95 -13.18,4.95 ; -13.82,6.3 -13.18,6.3 ; -10.82,4.95 -10.82,10.95 -10.18,10.95 -10.18,4.95 ; -10.82,6.3 -10.18,6.3 ; -7.82,4.95 -7.82,10.95 -7.18,10.95 -7.18,4.95 ; -7.82,6.3 -7.18,6.3 ; -4.82,4.95 -4.82,10.95 -4.18,10.95 -4.18,4.95 ; -4.82,6.3 -4.18,6.3 ; -1.82,4.95 -1.82,10.95 -1.18,10.95 -1.18,4.95 ; -1.82,6.3 -1.18,6.3 ; 1.18,4.95 1.18,10.95 1.82,10.95 1.82,4.95 ; 1.18,6.3 1.82,6.3 ; 4.18,4.95 4.18,10.95 4.82,10.95 4.82,4.95 ; 4.18,6.3 4.82,6.3 ; 7.18,4.95 7.18,10.95 7.82,10.95 7.82,4.95 ; 7.18,6.3 7.82,6.3 ; 10.18,4.95 10.18,10.95 10.82,10.95 10.82,4.95 ; 10.18,6.3 10.82,6.3 ; 13.18,4.95 13.18,10.95 13.82,10.95 13.82,4.95 ; 13.18,6.3 13.82,6.3 ; 16.18,4.95 16.18,10.95 16.82,10.95 16.82,4.95 ; 16.18,6.3 16.82,6.3 ; -19.85,-4.95 -19.85,4.95 19.85,4.95 19.85,-4.95 -19.85,-4.95
Top Courtyard:
  lines w0.05: -20.2,-5.225 -20.2,11.41 20.2,11.41 20.2,-5.225 -20.2,-5.225
Top Component Center:
  lines w0.05: -0.5,0 0.5,0 ; 0,-0.5 0,0.5
3D body "662024236022.stp": height 8.79, standoff -3.17, extent -19.85,-4.95 19.85,10.95

## 662102130822 [mm] "3.00mm SMT Male Single Row Angled Header with THT Retention Clip, 2p"
height 5.57
pads (4):
  rect 1.27x2.92 smd: 1(1.5,5.12) 2(-1.5,5.12)
  round 3.5 hole 2.35: MH1(-3.66,-0.35) MH2(3.66,-0.35)
Top Overlay:
  circle w0.4: c2.85,5.725 r0.2
  lines w0.2: -4.95,-1.975 -4.95,-5.025 4.95,-5.025 4.95,-1.975 ; -4.95,1.275 -4.95,5.025 -2.45,5.025 ; 2.45,5.025 4.95,5.025 4.95,1.275
Top Designator:
  text ".Designator" at -7.498,-0.5 h1.5
Top Component Outline:
  lines w0.1: -1.82,4.95 -1.82,6.4 -1.18,6.4 -1.18,4.95 ; 1.18,4.95 1.18,6.4 1.82,6.4 1.82,4.95 ; -4.825,-4.95 -4.825,4.95 4.825,4.95 4.825,-4.95 -4.825,-4.95
Top 3D Body:
  lines w0.1: -1.82,4.95 -1.82,6.4 -1.18,6.4 -1.18,4.95 ; 1.18,4.95 1.18,6.4 1.82,6.4 1.82,4.95 ; -4.825,-4.95 -4.825,4.95 4.825,4.95 4.825,-4.95 -4.825,-4.95
Top Courtyard:
  lines w0.05: -5.61,-5.225 -5.61,6.78 5.61,6.78 5.61,-5.225 -5.61,-5.225
Top Component Center:
  lines w0.05: -0.5,0 0.5,0 ; 0,-0.5 0,0.5
3D body "662102130822.stp": height 5.61, standoff -2.01, extent -4.825,-4.95 4.825,6.398

## 662102136022 [mm] "3.00mm SMT Male Right Angled Header with Snap-In Plastic Pegs, 2p"
height 5.57
pads (3):
  rect 1.27x2.92 smd: 1(1.5,5.12) 2(-1.5,5.12)
  round 3 hole 3 unplated: MH1(0,-0.35)
Top Overlay:
  circle w0.4: c2.85,5.725 r0.2
  lines w0.2: -2.45,5.025 -4.95,5.025 -4.95,-5.025 4.95,-5.025 4.95,5.025 2.45,5.025
Top Designator:
  text ".Designator" at -7.498,-0.5 h1.5
Top Component Outline:
  lines w0.1: -1.82,4.95 -1.82,6.4 -1.18,6.4 -1.18,4.95 ; 1.18,4.95 1.18,6.4 1.82,6.4 1.82,4.95 ; -4.825,-4.95 -4.825,4.95 4.825,4.95 4.825,-4.95 -4.825,-4.95
Top 3D Body:
  lines w0.1: -1.82,4.95 -1.82,6.4 -1.18,6.4 -1.18,4.95 ; 1.18,4.95 1.18,6.4 1.82,6.4 1.82,4.95 ; -4.825,-4.95 -4.825,4.95 4.825,4.95 4.825,-4.95 -4.825,-4.95
Top Courtyard:
  lines w0.05: -5.15,-5.225 -5.15,6.78 5.15,6.78 5.15,-5.225 -5.15,-5.225
Top Component Center:
  lines w0.05: -0.5,0 0.5,0 ; 0,-0.5 0,0.5
3D body "662102136022.stp": height 5.6, standoff -3.17, extent -4.825,-4.95 4.825,6.398

## 662102145021 [mm] "3.00mm Male Single Row Angled Header, 2p"
height 5.57
pads (4):
  rect 1.27x2.92 smd: 1(1.5,5.12) 2(-1.5,5.12)
  rect 3.43x1.65 smd: MP1(-5.395,-0.35) MP2(5.395,-0.35)
Top Overlay:
  circle w0.4: c3,5.8 r0.2
  lines w0.2: -4.95,-1.475 -4.95,-5.025 4.95,-5.025 4.95,-1.475 ; -4.95,0.775 -4.95,5.025 -2.45,5.025 ; 2.45,5.025 4.95,5.025 4.95,0.775
Top Designator:
  text ".Designator" at -7.498,-0.5 h1.5
Top Component Outline:
  lines w0.1: -4.825,-1 -6.825,-1 -6.825,0.3 -4.825,0.3 ; -1.82,4.95 -1.82,6.4 -1.18,6.4 -1.18,4.95 ; 1.18,4.95 1.18,6.4 1.82,6.4 1.82,4.95 ; 4.825,-1 6.825,-1 6.825,0.3 4.825,0.3 ; -4.825,-4.95 -4.825,4.95 4.825,4.95 4.825,-4.95 -4.825,-4.95
Top 3D Body:
  lines w0.1: -4.825,-1 -6.825,-1 -6.825,0.3 -4.825,0.3 ; -1.82,4.95 -1.82,6.4 -1.18,6.4 -1.18,4.95 ; 1.18,4.95 1.18,6.4 1.82,6.4 1.82,4.95 ; 4.825,-1 6.825,-1 6.825,0.3 4.825,0.3 ; -4.825,-4.95 4.825,-4.95 4.825,4.95 -4.825,4.95 -4.825,-4.95
Top Courtyard:
  lines w0.05: -7.31,-5.225 7.31,-5.225 7.31,6.78 -7.31,6.78 -7.31,-5.225
Top Component Center:
  lines w0.05: -0.5,0 0.5,0 ; 0,-0.5 0,0.5
3D body "662102145021.stp": height 5.61, standoff -0.03, extent -6.823,-4.95 6.823,6.403

## 662102145024 [mm] "3.00mm Male Single Row Angled Header, 2p"
height 5.57
pads (4):
  rect 1.27x2.92 smd: 1(1.5,5.12) 2(-1.5,5.12)
  rect 3.43x1.65 smd: MP1(-5.395,-0.35) MP2(5.395,-0.35)
Top Overlay:
  circle w0.4: c3,5.8 r0.2
  lines w0.2: -4.95,-1.475 -4.95,-5.025 4.95,-5.025 4.95,-1.475 ; -4.95,0.775 -4.95,5.025 -2.45,5.025 ; 2.45,5.025 4.95,5.025 4.95,0.775
Top Designator:
  text ".Designator" at -7.498,-0.5 h1.5
Top Component Outline:
  lines w0.1: -4.825,-1 -6.825,-1 -6.825,0.3 -4.825,0.3 ; -1.82,4.95 -1.82,6.4 -1.18,6.4 -1.18,4.95 ; 1.18,4.95 1.18,6.4 1.82,6.4 1.82,4.95 ; 4.825,-1 6.825,-1 6.825,0.3 4.825,0.3 ; -4.825,-4.95 4.825,-4.95 4.825,4.95 -4.825,4.95 -4.825,-4.95
Top 3D Body:
  lines w0.1: -4.825,-1 -6.825,-1 -6.825,0.3 -4.825,0.3 ; -1.82,4.95 -1.82,6.4 -1.18,6.4 -1.18,4.95 ; 1.18,4.95 1.18,6.4 1.82,6.4 1.82,4.95 ; 4.825,-1 6.825,-1 6.825,0.3 4.825,0.3 ; -4.825,-4.95 -4.825,4.95 4.825,4.95 4.825,-4.95 -4.825,-4.95
Top Courtyard:
  lines w0.05: -7.31,-5.225 -7.31,6.78 7.31,6.78 7.31,-5.225 -7.31,-5.225
Top Component Center:
  lines w0.05: -0.5,0 0.5,0 ; 0,-0.5 0,0.5
3D body "662102145024.stp": height 5.61, standoff -0.03, extent -6.823,-4.95 6.823,6.403

## 662102230822 [mm] "3.00mm SMT Male Dual Row Angled Header with THT Retention Clip, 2p"
height 8.26
pads (4):
  rect 1.27x2.92 smd: 1(0,5.13) 2(0,9.75)
  round 3.6 hole 2.41: MH1(-2.16,-0.35) MH2(2.16,-0.35)
Top Overlay:
  circle w0.5: c1.4,5.8 r0.2
  lines w0.2: -3.5,-1.975 -3.5,-5.025 3.5,-5.025 3.5,-1.975 ; -3.5,1.275 -3.5,5.025 -0.95,5.025 ; 0.95,5.025 3.5,5.025 3.5,1.275
Top Designator:
  text ".Designator" at -7.498,-0.5 h1.5
Top Component Outline:
  lines w0.1: -0.32,4.95 -0.32,10.95 0.32,10.95 0.32,4.95 ; -0.32,6.3 0.32,6.3 ; -3.35,-4.95 -3.35,4.95 3.35,4.95 3.35,-4.95 -3.35,-4.95
Top 3D Body:
  lines w0.1: -0.32,4.95 -0.32,10.95 0.32,10.95 0.32,4.95 ; -0.32,6.3 0.32,6.3 ; -3.35,-4.95 -3.35,4.95 3.35,4.95 3.35,-4.95 -3.35,-4.95
Top Courtyard:
  lines w0.05: -4.16,-5.225 4.16,-5.225 4.16,11.41 -4.16,11.41 -4.16,-5.225
Top Component Center:
  lines w0.05: -0.5,0 0.5,0 ; 0,-0.5 0,0.5
3D body "662102230822.stp": height 8.79, standoff -3.07, extent -3.35,-4.95 3.35,10.95

## 662102231722 [mm] "3.00mm SMT Male Dual Row Angled Header with SMT Solder Tab (Reel), 2p"
height 8.26
pads (4):
  rect 1.27x2.92 smd: 1(0,5.13) 2(0,9.75)
  rect 3.43x1.65 smd: MP1(-3.895,-0.35) MP2(3.895,-0.35)
Top Overlay:
  circle w0.4: c1.4,5.725 r0.2
  lines w0.2: -3.5,-1.475 -3.5,-5.025 3.5,-5.025 3.5,-1.475 ; -3.5,0.775 -3.5,5.025 -0.95,5.025 ; 0.95,5.025 3.5,5.025 3.5,0.775
Top Designator:
  text ".Designator" at -7.498,-0.5 h1.5
Top Component Outline:
  lines w0.1: -3.35,-1.1 -5.05,-1.1 -5.05,0.4 -3.35,0.4 ; -0.32,4.95 -0.32,10.95 0.32,10.95 0.32,4.95 ; -0.32,6.3 0.32,6.3 ; 3.35,-1.1 5.05,-1.1 5.05,0.4 3.35,0.4 ; -3.35,-4.95 3.35,-4.95 3.35,4.95 -3.35,4.95 -3.35,-4.95
Top 3D Body:
  lines w0.1: -3.35,-1.1 -5.05,-1.1 -5.05,0.4 -3.35,0.4 ; -0.32,4.95 -0.32,10.95 0.32,10.95 0.32,4.95 ; -0.32,6.3 0.32,6.3 ; 3.35,-1.1 5.05,-1.1 5.05,0.4 3.35,0.4 ; -3.35,-4.95 3.35,-4.95 3.35,4.95 -3.35,4.95 -3.35,-4.95
Top Courtyard:
  lines w0.05: -5.81,-5.225 -5.81,11.41 5.81,11.41 5.81,-5.225 -5.81,-5.225
Top Component Center:
  lines w0.05: -0.5,0 0.5,0 ; 0,-0.5 0,0.5
3D body "662102231722.stp": height 8.78, standoff 0.02, extent -5.05,-4.95 5.05,10.95

## 662102231724 [mm] "3.00mm SMT Male Dual Row Angled Header with SMT Solder Tab (Reel), 2p"
height 8.26
pads (4):
  rect 1.27x2.92 smd: 1(0,5.13) 2(0,9.75)
  rect 3.43x1.65 smd: MP1(-3.895,-0.35) MP2(3.895,-0.35)
Top Overlay:
  circle w0.4: c1.4,5.725 r0.2
  lines w0.2: -3.5,-1.475 -3.5,-5.025 3.5,-5.025 3.5,-1.475 ; -3.5,0.775 -3.5,5.025 -0.95,5.025 ; 0.95,5.025 3.5,5.025 3.5,0.775
Top Designator:
  text ".Designator" at -7.498,-0.5 h1.5
Top Component Outline:
  lines w0.1: -3.35,-1.1 -5.05,-1.1 -5.05,0.4 -3.35,0.4 ; -0.32,4.95 -0.32,10.95 0.32,10.95 0.32,4.95 ; -0.32,6.3 0.32,6.3 ; 3.35,-1.1 5.05,-1.1 5.05,0.4 3.35,0.4 ; -3.35,-4.95 3.35,-4.95 3.35,4.95 -3.35,4.95 -3.35,-4.95
Top 3D Body:
  lines w0.1: -3.35,-1.1 -5.05,-1.1 -5.05,0.4 -3.35,0.4 ; -0.32,4.95 -0.32,10.95 0.32,10.95 0.32,4.95 ; -0.32,6.3 0.32,6.3 ; 3.35,-1.1 5.05,-1.1 5.05,0.4 3.35,0.4 ; -3.35,-4.95 3.35,-4.95 3.35,4.95 -3.35,4.95 -3.35,-4.95
Top Courtyard:
  lines w0.05: -5.81,-5.225 -5.81,11.41 5.81,11.41 5.81,-5.225 -5.81,-5.225
Top Component Center:
  lines w0.05: -0.5,0 0.5,0 ; 0,-0.5 0,0.5
3D body "662102231724.stp": height 8.76, standoff 0, extent -5.05,-4.95 5.05,10.95

## 662102236022 [mm] "3.00mm SMT Male Dual Row Angled Header with Plastic Pegs, 2p"
height 8.26
pads (3):
  rect 1.27x2.92 smd: 1(0,5.13) 2(0,9.75)
  round 3 hole 3 unplated: MH1(0,-0.35)
Top Overlay:
  circle w0.4: c1.4,5.725 r0.2
  lines w0.2: -0.95,5.025 -3.5,5.025 -3.5,-5.025 3.5,-5.025 3.5,5.025 0.95,5.025
Top Designator:
  text ".Designator" at -7.498,-0.5 h1.5
Top Component Outline:
  lines w0.1: -0.32,4.95 -0.32,10.95 0.32,10.95 0.32,4.95 ; -0.32,6.3 0.32,6.3 ; -3.35,-4.95 3.35,-4.95 3.35,4.95 -3.35,4.95 -3.35,-4.95
Top 3D Body:
  lines w0.1: -0.32,4.95 -0.32,10.95 0.32,10.95 0.32,4.95 ; -0.32,6.3 0.32,6.3 ; -3.35,-4.95 3.35,-4.95 3.35,4.95 -3.35,4.95 -3.35,-4.95
Top Courtyard:
  lines w0.05: -3.7,-5.225 -3.7,11.41 3.7,11.41 3.7,-5.225 -3.7,-5.225
Top Component Center:
  lines w0.05: -0.5,0 0.5,0 ; 0,-0.5 0,0.5
3D body "662102236022.stp": height 8.79, standoff -3.17, extent -3.35,-4.95 3.35,10.95